# Altium footprint library George.PcbLib: 34 footprints (part 2 of 3)
Each footprint in its own frame and in the unit in brackets; x right, y up, seen from the top. Pads: shape width x height; smd on the part's side, far side on the other; paste and mask are expansions set on the pad; w line width, h text height; cw(c..) or ccw(c..) is an arc to the next point about the centre after c.
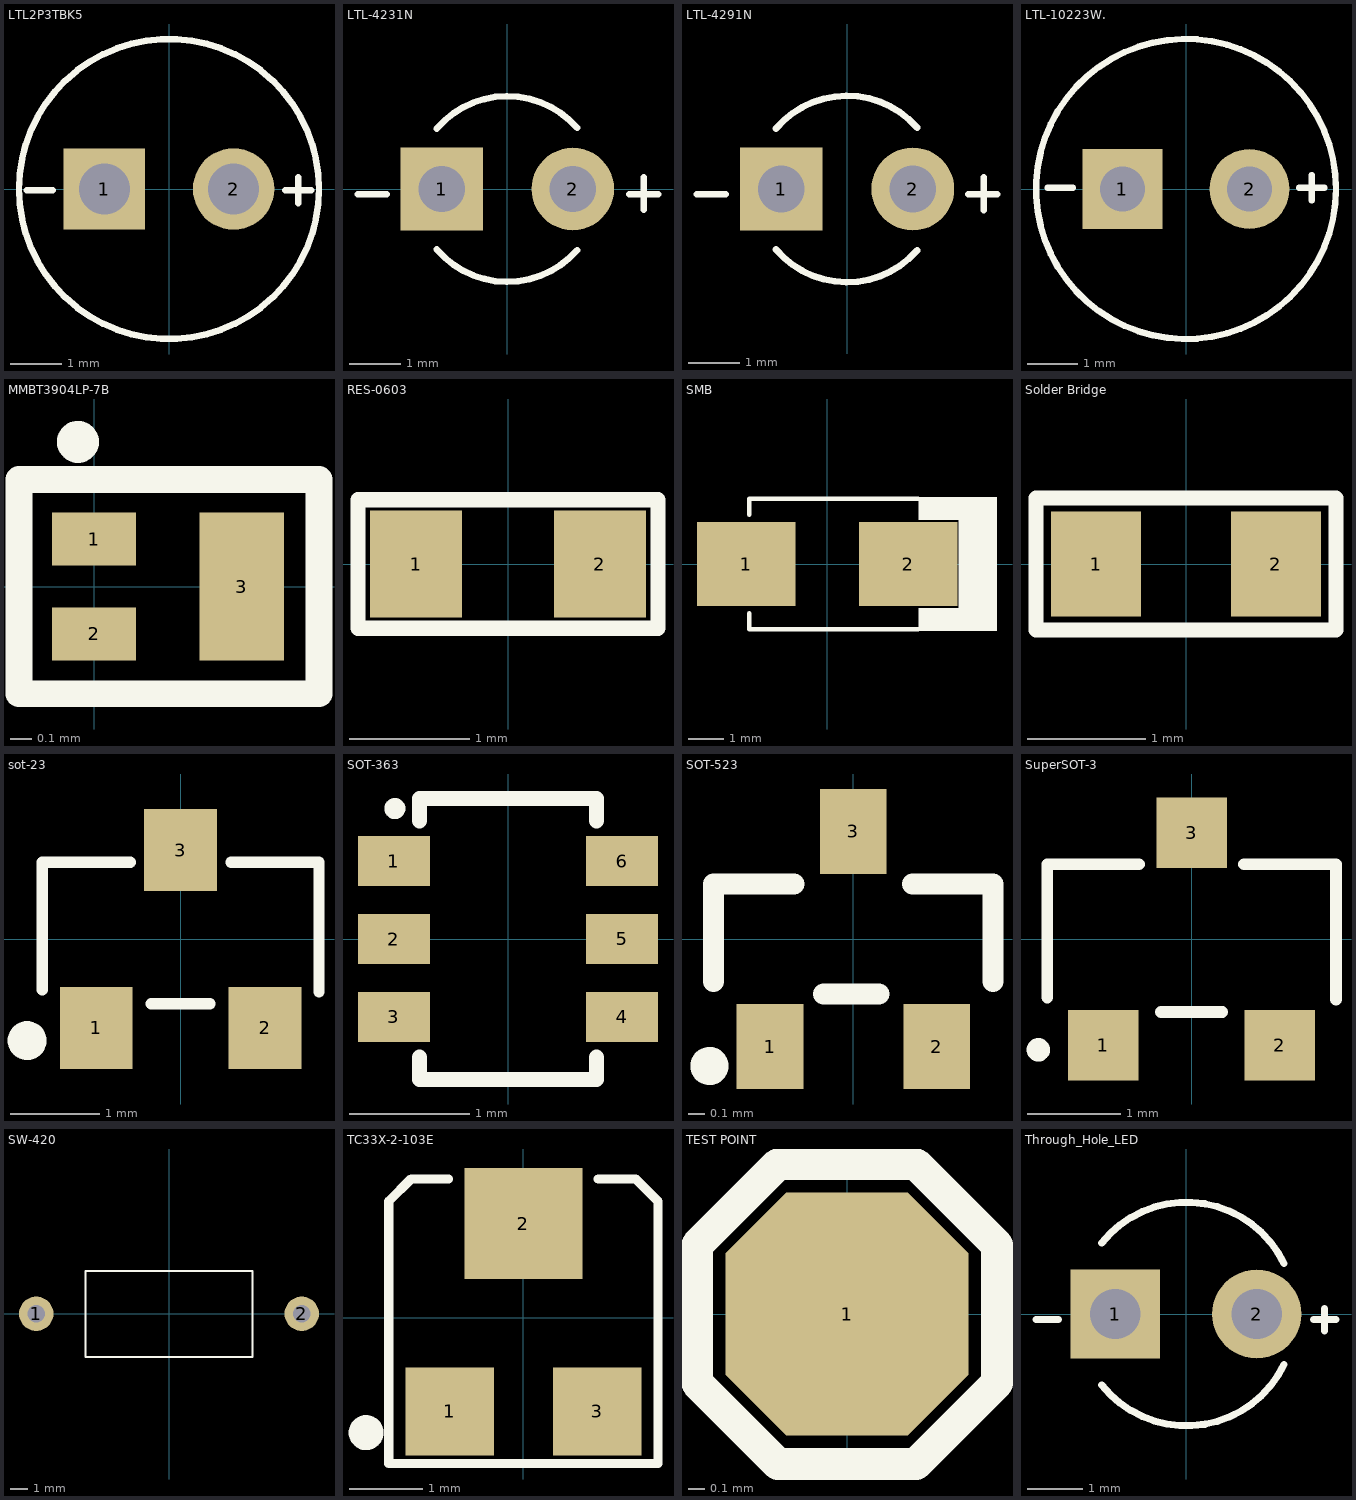
[diagram p1: the footprints below, top view; thin cyan lines are the x and y axes]

## LTL2P3TBK5 [mm]
pads (2):
  rect 1.6x1.6 hole 1: 1(-1.27,0)
  round 1.6 hole 1: 2(1.27,0)
Top Overlay:
  circle w0.127: c0,0 r2.95
  lines w0.127: -2.794,-0.025 -2.286,-0.025 ; 2.286,-0.025 2.794,-0.025 ; 2.54,-0.279 2.54,0.229
3D body "User Library-LED-D5Y.step": height 9.14, standoff -6.3, extent -2.5,-3 3,3

## LTL-4231N [mm]
pads (2):
  rect 1.6x1.6 hole 0.9: 1(-1.27,0)
  round 1.6 hole 0.9: 2(1.27,0)
Top Overlay:
  lines w0.127: -2.896,-0.102 -2.337,-0.102 ; -1.37,-1.167 ccw(c0,0) 1.353,-1.187 ; -1.37,1.167 cw(c0,0) 1.353,1.187 ; 2.362,-0.102 2.921,-0.102 ; 2.642,-0.406 2.642,0.229
3D body "User Library-LED 3 mm.step": height 6.25, standoff -10.8, extent -1.5,-1.998 2,1.998

## LTL-4291N [mm]
pads (2):
  rect 1.6x1.6 hole 0.9: 1(-1.27,-7.188)
  round 1.6 hole 0.9: 2(1.27,-7.188)
Top Overlay:
  lines w0.127: -2.896,-7.29 -2.337,-7.29 ; -1.37,-8.355 ccw(c0,-7.188) 1.353,-8.375 ; -1.37,-6.021 cw(c0,-7.188) 1.353,-6.001 ; 2.337,-7.29 2.896,-7.29 ; 2.642,-7.595 2.642,-6.96
3D body "User Library-LED 3 mm.step": height 6.25, standoff -10.8, extent -1.5,-9.186 2,-5.19

## LTL-10223W. [mm]
pads (2):
  rect 1.6x1.6 hole 0.9: 1(-1.27,0)
  round 1.6 hole 0.9: 2(1.27,0)
Top Overlay:
  circle w0.127: c0,0 r3
  lines w0.127: -2.769,0.025 -2.261,0.025 ; 2.261,0.025 2.769,0.025 ; 2.515,-0.229 2.515,0.279
3D body "User Library-LED-D5R.step": height 9.44, standoff -6, extent -2.5,-3 3,3

## MMBT3904LP-7B [mm]
pads (3):
  rect 0.4x0.25 smd: 1(0,0.225) 2(0,-0.225)
  rect 0.4x0.7 smd: 3(0.7,0)
Top Overlay:
  circle w0.127: c-0.076,0.686 r0.036
  lines w0.127: -0.356,-0.508 1.067,-0.508 1.067,0.508 -0.356,0.508 -0.356,-0.508

## RES-0603 [mil]
pads (2):
  rect 30x35 smd: 1(-30,0) 2(30,0)
Top Overlay:
  lines w5: -49,-21 -49,21 49,21 49,-21 -49,-21
3D body "User Library-RESC1608X05N.step": height 17.76, standoff 0, extent -30.52,-16.74 30.51,16.73

## SMB [mm]
pads (2):
  rect 2.8x2.4 smd: 1(-2.3,0) 2(2.3,0)
Top Overlay:
  rectangle: 2.591,-1.905 4.826,-1.245
  rectangle: 3.734,-1.651 4.826,1.346
  rectangle: 2.591,1.245 4.826,1.905
  lines w0.127: -2.21,-1.397 -2.21,-1.854 2.591,-1.854 ; -2.21,1.397 -2.21,1.854 2.591,1.854
3D body "User Library-DO-214AA SMB.step": height 2.3, standoff 0, extent -2.7,-1.8 2.7,1.8

## Solder Bridge [mil] "Solder Bridge ON"
pads (2):
  rect 30x35 smd: 1(-30,0) 2(30,0)
Top Overlay:
  lines w5: -50,-22 50,-22 50,22 -50,22 -50,-22

## sot-23 [mm]
pads (3):
  rect 0.82x0.92 smd: 1(-0.95,-1) 2(0.95,-1) 3(0,1)
Top Overlay:
  circle w0.254: c-1.727,-1.143 r0.092
  lines w0.127: -1.556,-0.572 -1.556,0.864 -0.566,0.864 ; -0.33,-0.728 0.33,-0.728 ; 0.566,0.864 1.556,0.864 1.556,-0.594
3D body "CircuitWorks-SOT-23.step": height 1.1, standoff 0, extent -1.5,-1.25 1.5,1.25

## SOT-363 [mm]
pads (6):
  rect 0.6x0.42 smd: 1(-0.95,0.65) 2(-0.95,0) 3(-0.95,-0.65) 4(0.95,-0.65) 5(0.95,0) 6(0.95,0.65)
Top Overlay:
  lines w0.127: -0.919,1.088 cw(c-0.943,1.087) -0.919,1.089 ; -0.737,-0.986 -0.737,-1.171 0.737,-1.171 0.737,-0.986 ; -0.737,0.986 -0.737,1.171 0.737,1.171 0.737,0.986
3D body "SOT363_DIO.step": height 1.09, standoff 0, extent -1.105,-1.105 1.105,1.105

## SOT-523 [mm]
pads (3):
  rect 0.4x0.51 smd: 1(-0.5,-0.645) 2(0.5,-0.645) 3(0,0.645)
Top Overlay:
  circle w0.127: c-0.864,-0.762 r0.051
  lines w0.127: -0.838,-0.254 -0.838,0.33 -0.356,0.33 ; -0.178,-0.33 0.152,-0.33 ; 0.356,0.33 0.838,0.33 0.838,-0.254
3D body "User Library-SOT-523.step": height 0.8, standoff 0, extent -0.8,-0.8 0.8,0.8

## SuperSOT-3 [mm]
pads (3):
  rect 0.76x0.76 smd: 1(-0.95,-1.145) 2(0.95,-1.145) 3(0,1.145)
Top Overlay:
  circle w0.2: c-1.651,-1.194 r0.025
  lines w0.127: -1.556,-0.63 -1.556,0.805 -0.566,0.805 ; -0.33,-0.786 0.33,-0.786 ; 0.566,0.805 1.556,0.805 1.556,-0.652
3D body "CircuitWorks-SOT-23.step": height 1.1, standoff 0, extent -1.5,-1.25 1.5,1.25

## SW-420 [mm]
pads (2):
  round 2 hole 1: 1(-7.7,0) 2(7.7,0)
Top Overlay:
  lines w0.127: -4.851,-2.515 0,-2.515 4.851,-2.515 4.851,2.485 0,2.485 -4.851,2.485 -4.851,-2.515
3D body "bl420dx.stp": height 5, standoff -2, extent -8,-2.5 8,2.5

## TC33X-2-103E [mm]
pads (3):
  rect 1.2x1.2 smd: 1(-1,-1.275) 3(1,-1.275)
  rect 1.6x1.5 smd: 2(0,1.275)
Top Overlay:
  circle w0.254: c-2.134,-1.562 r0.11
  lines w0.127: -1.016,1.88 -1.524,1.88 -1.826,1.578 -1.826,-1.98 1.826,-1.98 1.826,1.578 1.524,1.88 1.016,1.88
3D body "TC-33X-2.stp": height 1.13, standoff -0.02, extent -1.76,-1.915 1.84,2.047

## TEST POINT [mil]
pads (1):
  oct 60x60 smd: 1(0,0)
Top Overlay:
  lines w7.87: -17,-37 17,-37 ; -17,-37 -37,-17 -37,17 -17,37 ; -17,-37 17,-37 ; -17,37 17,37 ; -17,37 17,37 ; 17,-37 37,-17 37,17 17,37

## Through_Hole_LED [mm]
pads (2):
  rect 1.6x1.6 hole 0.9: 1(-1.27,0)
  round 1.6 hole 0.9: 2(1.27,0)
Top Overlay:
  lines w0.127: -2.692,-0.102 -2.286,-0.102 ; -1.512,-1.276 ccw(c0.007,-0.064) 1.759,-0.905 ; -1.512,1.276 cw(c0.007,0.064) 1.759,0.905 ; 2.286,-0.102 2.692,-0.102 ; 2.489,-0.305 2.489,0.102
3D body "20410UYOCS530A3.STEP": height 5.2, standoff -17, extent -1.52,-1.9 1.9,1.9